# Altium footprint library PS1CO1000.PcbLib: 1 footprints
Each footprint in its own frame and in the unit in brackets; x right, y up, seen from the top. Pads: shape width x height; smd on the part's side, far side on the other; paste and mask are expansions set on the pad; w line width, h text height; cw(c..) or ccw(c..) is an arc to the next point about the centre after c.
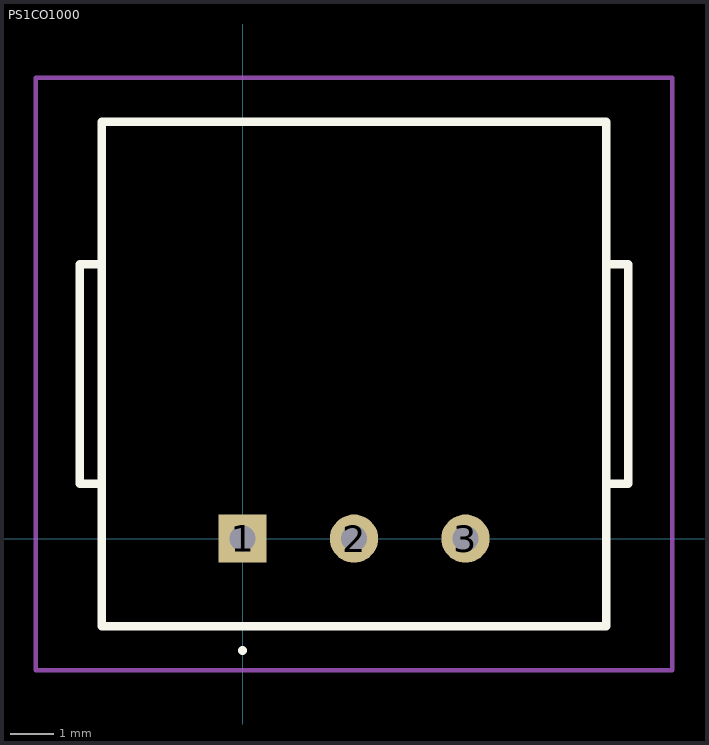
[diagram p0: the footprint, top view; thin cyan lines are the x and y axes]

## PS1CO1000 [mm]
pads (3):
  rect 1.1x1.1 hole 0.6: 1(0,0)
  round 1.1 hole 0.6: 2(2.54,0) 3(5.08,0)
Top Overlay:
  lines w0.1: 0,-2.6 cw(c0,-2.55) 0,-2.5 ; 0,-2.6 0,-2.6 ; 0,-2.6 ccw(c0,-2.55) 0,-2.5 ; 0,-2.5 0,-2.5
  lines w0.2: -3.21,1.25 -3.71,1.25 -3.71,6.25 -3.21,6.25 ; 8.29,1.25 8.79,1.25 8.79,6.25 8.29,6.25 ; -3.21,-2 8.29,-2 8.29,9.5 -3.21,9.5 -3.21,-2
Mechanical 15:
  lines w0.1: -3.21,1.25 -3.71,1.25 -3.71,6.25 -3.21,6.25 ; 8.29,1.25 8.79,1.25 8.79,6.25 8.29,6.25 ; -3.21,-2 8.29,-2 8.29,9.5 -3.21,9.5 -3.21,-2
Mechanical 20:
  lines w0.1: -4.71,-3 9.79,-3 9.79,10.5 -4.71,10.5 -4.71,-3